# Altium footprint library Miscellaneous Connectors.PcbLib: 245 footprints (part 2 of 16)
Each footprint in its own frame and in the unit in brackets; x right, y up, seen from the top. Pads: shape width x height; smd on the part's side, far side on the other; paste and mask are expansions set on the pad; w line width, h text height; cw(c..) or ccw(c..) is an arc to the next point about the centre after c.
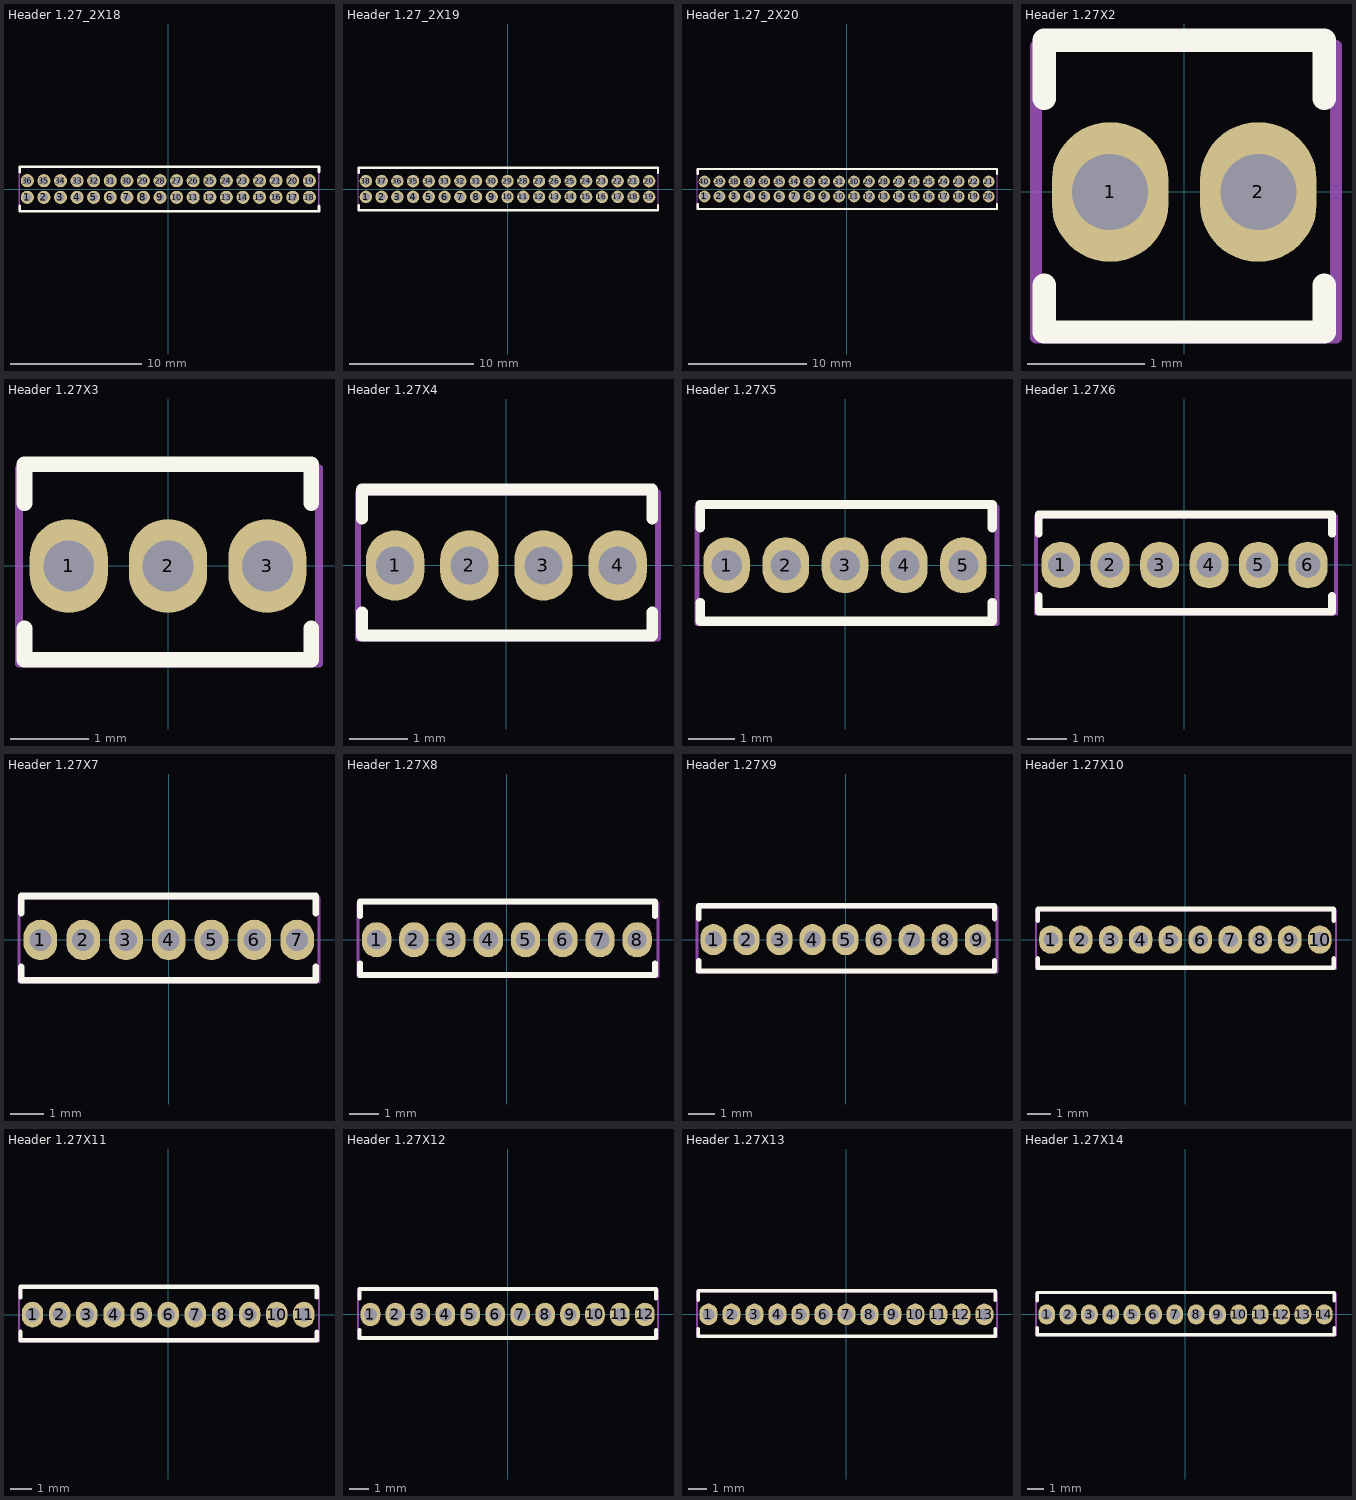
[diagram p1: the footprints below, top view; thin cyan lines are the x and y axes]

## Header 1.27_2X18 [mm]
pads (36):
  round 1 hole 0.65: 1(-10.795,-0.635) 2(-9.525,-0.635) 3(-8.255,-0.635) 4(-6.985,-0.635) 5(-5.715,-0.635) 6(-4.445,-0.635) 7(-3.175,-0.635) 8(-1.905,-0.635) 9(-0.635,-0.635) 10(0.635,-0.635) 11(1.905,-0.635) 12(3.175,-0.635) 13(4.445,-0.635) 14(5.715,-0.635) 15(6.985,-0.635) 16(8.255,-0.635) 17(9.525,-0.635) 18(10.795,-0.635) 19(10.795,0.635) 20(9.525,0.635) 21(8.255,0.635) 22(6.985,0.635) 23(5.715,0.635) 24(4.445,0.635) 25(3.175,0.635) 26(1.905,0.635) 27(0.635,0.635) 28(-0.635,0.635) 29(-1.905,0.635) 30(-3.175,0.635) 31(-4.445,0.635) 32(-5.715,0.635) 33(-6.985,0.635) 34(-8.255,0.635) 35(-9.525,0.635) 36(-10.795,0.635)
Top Overlay:
  lines w0.2: -11.36,-1.3 -11.36,-1.7 11.535,-1.7 11.535,-1.3 ; -11.36,1.3 -11.36,1.7 11.535,1.7 11.535,1.305
Mechanical 15:
  lines w0.1: -11.43,-1.7 -11.43,1.7 11.535,1.7 11.535,-1.7 -11.43,-1.7
3D body: height 4.7, standoff -2.6, extent -11.43,-1.5 11.43,1.5

## Header 1.27_2X19 [mm]
pads (38):
  round 1 hole 0.65: 1(-11.43,-0.635) 2(-10.16,-0.635) 3(-8.89,-0.635) 4(-7.62,-0.635) 5(-6.35,-0.635) 6(-5.08,-0.635) 7(-3.81,-0.635) 8(-2.54,-0.635) 9(-1.27,-0.635) 10(0,-0.635) 11(1.27,-0.635) 12(2.54,-0.635) 13(3.81,-0.635) 14(5.08,-0.635) 15(6.35,-0.635) 16(7.62,-0.635) 17(8.89,-0.635) 18(10.16,-0.635) 19(11.43,-0.635) 20(11.43,0.635) 21(10.16,0.635) 22(8.89,0.635) 23(7.62,0.635) 24(6.35,0.635) 25(5.08,0.635) 26(3.81,0.635) 27(2.54,0.635) 28(1.27,0.635) 29(0,0.635) 30(-1.27,0.635) 31(-2.54,0.635) 32(-3.81,0.635) 33(-5.08,0.635) 34(-6.35,0.635) 35(-7.62,0.635) 36(-8.89,0.635) 37(-10.16,0.635) 38(-11.43,0.635)
Top Overlay:
  lines w0.2: -11.995,-1.3 -11.995,-1.7 12.14,-1.7 12.14,-1.3 ; -11.995,1.3 -11.995,1.7 12.14,1.7 12.14,1.3
Mechanical 15:
  lines w0.1: -12.065,-1.7 12.14,-1.7 12.14,1.7 -12.065,1.7 -12.065,-1.7
3D body: height 4.7, standoff -2.6, extent -12.065,-1.5 12.065,1.5

## Header 1.27_2X20 [mm]
pads (40):
  round 1 hole 0.65: 1(-12.065,-0.635) 2(-10.795,-0.635) 3(-9.525,-0.635) 4(-8.255,-0.635) 5(-6.985,-0.635) 6(-5.715,-0.635) 7(-4.445,-0.635) 8(-3.175,-0.635) 9(-1.905,-0.635) 10(-0.635,-0.635) 11(0.635,-0.635) 12(1.905,-0.635) 13(3.175,-0.635) 14(4.445,-0.635) 15(5.715,-0.635) 16(6.985,-0.635) 17(8.255,-0.635) 18(9.525,-0.635) 19(10.795,-0.635) 20(12.065,-0.635) 21(12.065,0.635) 22(10.795,0.635) 23(9.525,0.635) 24(8.255,0.635) 25(6.985,0.635) 26(5.715,0.635) 27(4.445,0.635) 28(3.175,0.635) 29(1.905,0.635) 30(0.635,0.635) 31(-0.635,0.635) 32(-1.905,0.635) 33(-3.175,0.635) 34(-4.445,0.635) 35(-5.715,0.635) 36(-6.985,0.635) 37(-8.255,0.635) 38(-9.525,0.635) 39(-10.795,0.635) 40(-12.065,0.635)
Top Overlay:
  lines w0.2: -12.63,-1.3 -12.63,-1.7 12.775,-1.7 12.775,-1.3 ; -12.63,1.3 -12.63,1.7 12.775,1.7 12.775,1.3
Mechanical 15:
  lines w0.1: -12.7,-1.7 12.775,-1.7 12.775,1.7 -12.7,1.7 -12.7,-1.7
3D body: height 4.7, standoff -2.6, extent -12.7,-1.5 12.7,1.5

## Header 1.27X2 [mm]
pads (2):
  oval 1x1.2 hole 0.65: 1(-0.635,0) 2(0.635,0)
Top Overlay:
  lines w0.2: -1.2,-0.8 -1.2,-1.2 1.2,-1.2 1.2,-0.8 ; -1.2,0.8 -1.2,1.3 1.2,1.3 1.2,0.8
Mechanical 15:
  lines w0.1: -1.27,-1.25 1.3,-1.25 1.3,1.25 -1.27,1.25 -1.27,-1.25
3D body: height 5.34, standoff -2.6, extent -1.24,-1.25 1.3,1.25

## Header 1.27X3 [mm]
pads (3):
  oval 1x1.2 hole 0.65: 1(-1.27,0) 2(0,0) 3(1.27,0)
Top Overlay:
  lines w0.2: -1.835,-0.8 -1.835,-1.2 1.83,-1.2 1.83,-0.8 ; -1.835,0.8 -1.835,1.3 1.83,1.3 1.83,0.8
Mechanical 15:
  lines w0.1: -1.905,-1.25 -1.905,1.25 1.93,1.25 1.93,-1.25 -1.905,-1.25
3D body: height 5.34, standoff -2.6, extent -1.875,-1.25 1.935,1.25

## Header 1.27X4 [mm]
pads (4):
  oval 1x1.2 hole 0.65: 1(-1.905,0) 2(-0.635,0) 3(0.635,0) 4(1.905,0)
Top Overlay:
  lines w0.2: -2.47,-0.8 -2.47,-1.2 2.495,-1.2 2.495,-0.8 ; -2.47,0.8 -2.47,1.3 2.495,1.3 2.495,0.8
Mechanical 15:
  lines w0.1: -2.54,-1.25 -2.54,1.25 2.595,1.25 2.595,-1.25 -2.54,-1.25
3D body: height 5.34, standoff -2.6, extent -2.51,-1.25 2.57,1.25

## Header 1.27X5 [mm]
pads (5):
  oval 1x1.2 hole 0.65: 1(-2.54,0) 2(-1.27,0) 3(0,0) 4(1.27,0) 5(2.54,0)
Top Overlay:
  lines w0.2: -3.105,-0.8 -3.105,-1.2 3.16,-1.2 3.16,-0.8 ; -3.105,0.8 -3.105,1.3 3.16,1.3 3.16,0.8
Mechanical 15:
  lines w0.1: -3.175,-1.25 3.26,-1.25 3.26,1.25 -3.175,1.25 -3.175,-1.25
3D body: height 5.34, standoff -2.6, extent -3.145,-1.25 3.205,1.25

## Header 1.27X6 [mm]
pads (6):
  oval 1x1.2 hole 0.65: 1(-3.175,0) 2(-1.905,0) 3(-0.635,0) 4(0.635,0) 5(1.905,0) 6(3.175,0)
Top Overlay:
  lines w0.2: -3.74,-0.8 -3.74,-1.2 3.795,-1.2 3.795,-0.8 ; -3.74,0.8 -3.74,1.3 3.795,1.3 3.795,0.8
Mechanical 15:
  lines w0.1: -3.81,-1.25 -3.81,1.25 3.895,1.25 3.895,-1.25 -3.81,-1.25
3D body: height 5.34, standoff -2.6, extent -3.78,-1.25 3.84,1.25

## Header 1.27X7 [mm]
pads (7):
  oval 1x1.2 hole 0.65: 1(-3.81,0) 2(-2.54,0) 3(-1.27,0) 4(0,0) 5(1.27,0) 6(2.54,0) 7(3.81,0)
Top Overlay:
  lines w0.2: -4.375,-0.8 -4.375,-1.2 4.36,-1.2 4.36,-0.8 ; -4.375,0.8 -4.375,1.3 4.36,1.3 4.36,0.8
Mechanical 15:
  lines w0.1: -4.445,-1.25 -4.445,1.25 4.46,1.25 4.46,-1.25 -4.445,-1.25
3D body: height 5.34, standoff -2.6, extent -4.415,-1.25 4.475,1.25

## Header 1.27X8 [mm]
pads (8):
  oval 1x1.2 hole 0.65: 1(-4.445,0) 2(-3.175,0) 3(-1.905,0) 4(-0.635,0) 5(0.635,0) 6(1.905,0) 7(3.175,0) 8(4.445,0)
Top Overlay:
  lines w0.2: -5.01,-0.8 -5.01,-1.2 5.055,-1.2 5.055,-0.8 ; -5.01,0.8 -5.01,1.3 5.055,1.3 5.055,0.8
Mechanical 15:
  lines w0.1: -5.08,-1.25 -5.08,1.25 5.155,1.25 5.155,-1.25 -5.08,-1.25
3D body: height 5.34, standoff -2.6, extent -5.05,-1.25 5.11,1.25

## Header 1.27X9 [mm]
pads (9):
  oval 1x1.2 hole 0.65: 1(-5.08,0) 2(-3.81,0) 3(-2.54,0) 4(-1.27,0) 5(0,0) 6(1.27,0) 7(2.54,0) 8(3.81,0) 9(5.08,0)
Top Overlay:
  lines w0.2: -5.645,-0.8 -5.645,-1.2 5.72,-1.2 5.72,-0.8 ; -5.645,0.8 -5.645,1.3 5.72,1.3 5.72,0.8
Mechanical 15:
  lines w0.1: -5.715,-1.25 5.82,-1.25 5.82,1.25 -5.715,1.25 -5.715,-1.25
3D body: height 5.34, standoff -2.6, extent -5.685,-1.25 5.745,1.25

## Header 1.27X10 [mm]
pads (10):
  oval 1x1.2 hole 0.65: 1(-5.715,0) 2(-4.445,0) 3(-3.175,0) 4(-1.905,0) 5(-0.635,0) 6(0.635,0) 7(1.905,0) 8(3.175,0) 9(4.445,0) 10(5.715,0)
Top Overlay:
  lines w0.2: -6.28,-0.8 -6.28,-1.2 6.305,-1.2 6.305,-0.8 ; -6.28,0.8 -6.28,1.3 6.305,1.3 6.305,0.8
Mechanical 15:
  lines w0.1: -6.35,-1.25 6.405,-1.25 6.405,1.25 -6.35,1.25 -6.35,-1.25
3D body: height 5.34, standoff -2.6, extent -6.32,-1.25 6.38,1.25

## Header 1.27X11 [mm]
pads (11):
  oval 1x1.2 hole 0.65: 1(-6.35,0) 2(-5.08,0) 3(-3.81,0) 4(-2.54,0) 5(-1.27,0) 6(0,0) 7(1.27,0) 8(2.54,0) 9(3.81,0) 10(5.08,0) 11(6.35,0)
Top Overlay:
  lines w0.2: -6.915,-0.8 -6.915,-1.2 6.96,-1.2 6.96,-0.8 ; -6.915,0.8 -6.915,1.3 6.96,1.3 6.96,0.8
Mechanical 15:
  lines w0.1: -6.985,-1.25 -6.985,1.25 7.06,1.25 7.06,-1.25 -6.985,-1.25
3D body: height 5.34, standoff -2.6, extent -6.955,-1.25 7.015,1.25

## Header 1.27X12 [mm]
pads (12):
  oval 1x1.2 hole 0.65: 1(-6.985,0) 2(-5.715,0) 3(-4.445,0) 4(-3.175,0) 5(-1.905,0) 6(-0.635,0) 7(0.635,0) 8(1.905,0) 9(3.175,0) 10(4.445,0) 11(5.715,0) 12(6.985,0)
Top Overlay:
  lines w0.2: -7.55,-0.8 -7.55,-1.2 7.555,-1.2 7.555,-0.8 ; -7.55,0.8 -7.55,1.3 7.555,1.3 7.555,0.8
Mechanical 15:
  lines w0.1: -7.62,-1.25 7.655,-1.25 7.655,1.25 -7.62,1.25 -7.62,-1.25
3D body: height 5.34, standoff -2.6, extent -7.59,-1.25 7.65,1.25

## Header 1.27X13 [mm]
pads (13):
  oval 1x1.2 hole 0.65: 1(-7.62,0) 2(-6.35,0) 3(-5.08,0) 4(-3.81,0) 5(-2.54,0) 6(-1.27,0) 7(0,0) 8(1.27,0) 9(2.54,0) 10(3.81,0) 11(5.08,0) 12(6.35,0) 13(7.62,0)
Top Overlay:
  lines w0.2: -8.185,-0.8 -8.185,-1.2 8.22,-1.2 8.22,-0.8 ; -8.185,0.8 -8.185,1.3 8.22,1.3 8.22,0.8
Mechanical 15:
  lines w0.1: -8.255,-1.25 -8.255,1.25 8.32,1.25 8.32,-1.25 -8.255,-1.25
3D body: height 5.34, standoff -2.6, extent -8.225,-1.25 8.285,1.25

## Header 1.27X14 [mm]
pads (14):
  oval 1x1.2 hole 0.65: 1(-8.255,0) 2(-6.985,0) 3(-5.715,0) 4(-4.445,0) 5(-3.175,0) 6(-1.905,0) 7(-0.635,0) 8(0.635,0) 9(1.905,0) 10(3.175,0) 11(4.445,0) 12(5.715,0) 13(6.985,0) 14(8.255,0)
Top Overlay:
  lines w0.2: -8.82,-0.8 -8.82,-1.2 8.855,-1.2 8.855,-0.8 ; -8.82,0.8 -8.82,1.3 8.855,1.3 8.855,0.8
Mechanical 15:
  lines w0.1: -8.89,-1.25 8.955,-1.25 8.955,1.25 -8.89,1.25 -8.89,-1.25
3D body: height 5.34, standoff -2.6, extent -8.86,-1.25 8.92,1.25